# Altium footprint library FootPrintLib_8.PcbLib: 590 footprints (part 5 of 37)
Each footprint in its own frame and in the unit in brackets; x right, y up, seen from the top. Pads: shape width x height; smd on the part's side, far side on the other; paste and mask are expansions set on the pad; w line width, h text height; cw(c..) or ccw(c..) is an arc to the next point about the centre after c.
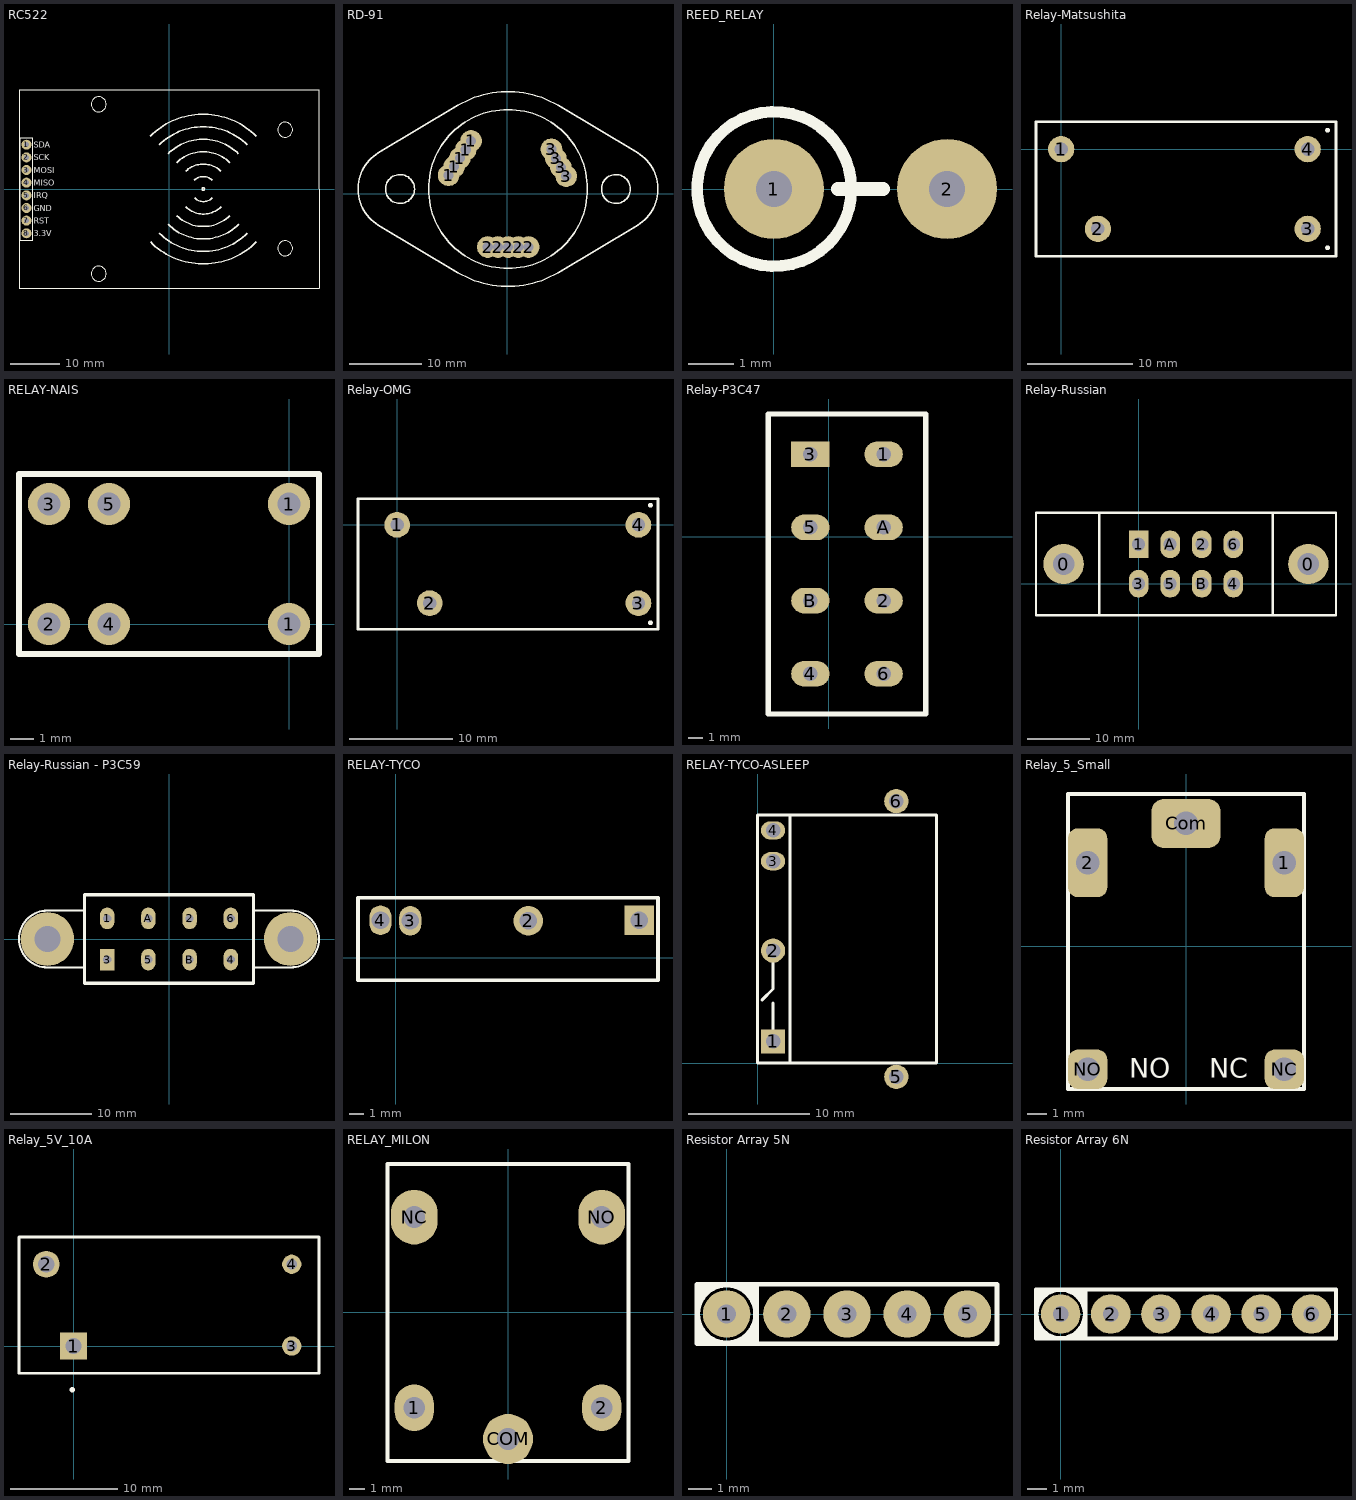
[diagram p4: the footprints below, top view; thin cyan lines are the x and y axes]

## RC522 [mm] "RC522, 8-Leads, Pitch 2.54mm"
height 5
pads (8):
  round 2 hole 1: 1(-28.6,8.89) 2(-28.6,6.35) 3(-28.6,3.81) 4(-28.6,1.27) 5(-28.6,-1.27) 6(-28.6,-3.81) 7(-28.6,-6.35) 8(-28.6,-8.89)
Top Overlay:
  circle w0.2: c-14.1,-17 r1.5
  circle w0.2: c-14.1,17 r1.5
  circle w0.2: c23.3,-11.9 r1.5
  circle w0.2: c23.3,11.9 r1.5
  circle w0.3: c6.875,0 r0.25
  lines w0.2: -30.1,-19.9 -30.1,19.9 30.1,19.9 30.1,-19.9 -30.1,-19.9 ; -29.85,-10.3 -29.85,10.325 -27.35,10.325 -27.35,-10.3 -29.85,-10.3
  lines w0.3: -3.732,10.607 cw(c6.875,0) 17.482,10.607 ; -3.707,-10.632 ccw(c6.9,-0.025) 17.507,-10.632 ; -1.964,8.839 cw(c6.875,0) 15.714,8.839 ; -1.939,-8.864 ccw(c6.9,-0.025) 15.739,-8.864 ; -0.196,7.071 cw(c6.875,0) 13.946,7.071 ; -0.171,-7.096 ccw(c6.9,-0.025) 13.971,-7.096 ; 1.572,5.303 cw(c6.875,0) 12.178,5.303 ; 1.597,-5.328 ccw(c6.9,-0.025) 12.203,-5.328 ; 3.339,3.536 cw(c6.875,0) 10.411,3.536 ; 3.364,-3.561 ccw(c6.9,-0.025) 10.436,-3.561 ; 5.107,1.768 cw(c6.875,0) 8.643,1.768 ; 5.132,-1.793 ccw(c6.9,-0.025) 8.668,-1.793
  text "SDA" at -27.125,7.875 h2
  text "SCK" at -27.125,5.335 h2
  text "MOSI" at -27.125,2.795 h2
  text "MISO" at -27.125,0.255 h2
  text "IRQ" at -27.125,-2.285 h2
  text "GND" at -27.125,-4.825 h2
  text "RST" at -27.125,-7.365 h2
  text "3.3V" at -27.125,-9.905 h2
3D body "RC522_V2.step": height 7.9, standoff -5.57, extent -30.1,-19.9 30.1,19.9

## RD-91 [mm]
pads (14):
  round 3 hole 1.4: 1(-8.145,2.595) 1(-7.375,3.785) 1(-6.595,4.965) 1(-5.775,6.125) 1(-5.035,7.345) 2(-2.725,-7.345) 2(-1.315,-7.345) 2(0.105,-7.345) 2(1.515,-7.345) 2(2.935,-7.345) 3(6.095,6.195) 3(6.715,4.915) 3(7.415,3.675) 3(8.145,2.465)
Top Overlay:
  circle w0.2: c0.08,0.69 r11
  circle w0.2: c-14.87,0.69 r2
  circle w0.2: c15.03,0.69 r2
  lines w0.2: -17.861,-4.31 cw(c-14.87,0.69) -17.861,5.69 -6.85,12.276 cw(c0.08,0.69) 7.01,12.276 18.021,5.69 cw(c15.03,0.69) 18.021,-4.31 7.01,-10.896 cw(c0.08,0.69) -6.85,-10.896 -17.861,-4.31
3D body "BTA_40_700_D.SLDPRT": height 17, standoff -6.5, extent -20.671,-12.844 20.881,14.156

## REED_RELAY [mm]
height 11
pads (2):
  round 2.2 hole 0.8: 1(0,0) 2(3.81,0)
Top Overlay:
  circle w0.254: c0.007,0 r1.7
  lines w0.305: 1.405,0 2.405,0
3D body "Standex-Meder Electronics-MK14-1A66_WEB.STEP": height 56.45, standoff -2.45, extent 0.032,-2 4.032,2

## Relay-Matsushita [mm] "Relay Matsushita 24VDC 10A"
height 19.05
pads (4):
  round 2.5 hole 1.3: 1(0,0) 2(3.5,-7.6) 3(23.5,-7.6) 4(23.5,0)
Top Overlay:
  circle w0.254: c25.4,-9.4 r0.1
  circle w0.254: c25.4,1.8 r0.1
  lines w0.254: -2.4,-10.2 -2.4,2.6 26.2,2.6 26.2,-10.2 -2.4,-10.2

## RELAY-NAIS [mil]
pads (6):
  round 70 hole 38: 1(0,0) 1(0,200) 2(-400,0) 3(-400,200) 4(-300,0) 5(-300,200)
Top Overlay:
  lines w10: -450,-50 -450,250 50,250 50,-50 -450,-50

## Relay-OMG [mm] "Relay Matsushita 24VDC 10A"
height 19.05
pads (4):
  round 2.5 hole 1.3: 1(0,0) 2(3.175,-7.62) 3(23.495,-7.62) 4(23.495,0)
Top Overlay:
  circle w0.254: c24.665,-9.525 r0.1
  circle w0.254: c24.665,1.905 r0.1
  lines w0.254: -3.81,-10.16 -3.81,2.54 25.4,2.54 25.4,-10.16 -3.81,-10.16

## Relay-P3C47 [mil]
pads (8):
  oval 105x70 hole 39.37: 1(150,225) 2(150,-175) 4(-50,-375) 5(-50,25) 6(150,-375) A(150,25) B(-50,-175)
  rect 105x70 hole 39.37: 3(-50,225)
Top Overlay:
  lines w15: -165,-485 265,-485 265,335 -165,335 -165,-485

## Relay-Russian [mm]
height 40
pads (10):
  round 6.5 hole 3.5 mask-2: 0(-12.065,3.175) 0(27.305,3.175)
  rect 3.175x4.445 hole 2.1: 1(0,6.35)
  oval 3.175x4.445 hole 2.1: 2(10.16,6.35) 3(0,0) 4(15.24,0) 5(5.08,0) 6(15.24,6.35) A(5.08,6.35) B(10.16,0)
Top Overlay:
  lines w0.381: -6.35,-5.08 21.59,-5.08 ; -6.35,-5.08 -6.35,11.43 ; -6.35,-5.08 -16.51,-5.08 -16.51,11.43 -6.35,11.43 ; -6.35,11.43 21.59,11.43 ; 21.59,-5.08 21.59,11.43 ; 21.59,-5.08 31.75,-5.08 31.75,11.43 21.59,11.43

## Relay-Russian - P3C59 [mil]
height 1574.8
pads (10):
  oval 70x105 hole 39.37: 1(-300,100) 2(100,100) 4(300,-100) 5(-100,-100) 6(300,100) A(-100,100) B(100,-100)
  rect 70x105 hole 39.37: 3(-300,-100)
  round 260 hole 125.98: ""(-590.55,0) ""(590.55,0)
Top Overlay:
  lines w10: -413.39,-137.8 -590.55,-137.8 cw(c-590.55,0) -590.55,137.8 -413.39,137.8 ; 413.39,-137.8 590.55,-137.8 ccw(c590.55,0) 590.55,137.8 413.39,137.8
  lines w15: -410,-215 -410,215 410,215 410,-215 -410,-215

## RELAY-TYCO [mm]
pads (4):
  rect 2x2 hole 1.2: 1(16.51,2.54)
  round 2 hole 1.2: 2(9,2.5)
  oval 1.5x2 hole 1.2: 3(1,2.5) 4(-1.016,2.54)
Top Overlay:
  lines w0.254: -2.54,-1.524 -2.54,4.064 17.78,4.064 17.78,-1.524 -2.54,-1.524

## RELAY-TYCO-ASLEEP [mm]
pads (6):
  rect 2x2 hole 1.2: 1(1.27,1.778)
  round 2 hole 1.2: 2(1.27,9.271) 5(11.43,-1.143) 6(11.43,21.59)
  oval 2x1.5 hole 1.2: 3(1.27,16.637) 4(1.27,19.177)
Top Overlay:
  lines w0.254: 0.381,5.207 1.27,6.096 1.27,9.271 ; 1.27,1.778 1.27,4.953 ; 2.667,0 2.667,20.447 ; 0,0 14.732,0 14.732,20.447 0,20.447 0,0

## Relay_5_Small [mm]
height 13
pads (5):
  rrect50% 2x3.5 hole 1.2: 1(5,4.25) 2(-5,4.25)
  rrect50% 3.5x2.5 hole 1.2: Com(0,6.25)
  rrect50% 2x2 hole 1.2: NC(5,-6.25) NO(-5,-6.25)
Top Overlay:
  lines w0.2: -6,-7.25 -6,7.75 6,7.75 6,-7.25 -6,-7.25
  text "NO" at -2.896,-6.68 h1
  text "NC" at 1.194,-6.68 h1
3D body "User Library-T74 4181.STEP": height 13.71, standoff -3.89, extent -6.131,-7.583 6.17,8.117

## Relay_5V_10A [mm]
height 14
pads (4):
  rect 2.5x2.5 hole 1.5: 1(0,0)
  round 2.5 hole 1.5: 2(-2.54,7.62)
  round 1.8 hole 1: 3(20.32,0) 4(20.32,7.62)
Top Overlay:
  circle w0.25: c-0.125,-4.064 r0.125
  lines w0.254: -5.08,-2.54 -5.08,10.16 22.86,10.16 22.86,-2.54 -5.08,-2.54

## RELAY_MILON [mm]
height 15.5
pads (5):
  oval 2.5x3 hole 1.4: 1(-6,-6.1) 2(6,-6.1)
  round 3.2 hole 1.4: COM(0,-8.1)
  oval 3x3.5 hole 1.4: NC(-6,6.1) NO(6,6.1)
Top Overlay:
  lines w0.254: -7.7,-9.5 7.7,-9.5 7.7,9.5 -7.7,9.5 -7.7,-9.5

## Resistor Array 5N [mm] "Resistor Networks, P2.54mm"
height 5.2
pads (5):
  round 2 hole 0.8: 1(0,0) 2(2.54,0) 3(5.08,0) 4(7.62,0) 5(10.16,0)
Top Overlay:
  circle w0.2: c0,0 r1.221
  region: 1.27,1.25 1.27,0.35 0.37,1.25
  region: 1.27,-1.25 0.37,-1.25 1.27,-0.35
  region: -1.25,-1.25 -1.25,-0.35 -0.35,-1.25
  region: -1.25,1.25 -0.35,1.25 -1.25,0.35
  lines w0.2: 1.27,-1.25 1.27,1.25 ; -1.25,-1.25 11.41,-1.25 11.41,1.25 -1.25,1.25 -1.25,-1.25
3D body "ResArray 5N.step": height 5.63, standoff -2.95, extent -1.27,-1.261 11.43,1.25

## Resistor Array 6N [mm] "Resistor Networks, P2.54mm"
height 5.2
pads (6):
  round 2 hole 0.8: 1(0,0) 2(2.54,0) 3(5.08,0) 4(7.62,0) 5(10.16,0) 6(12.7,0)
Top Overlay:
  circle w0.2: c0,0 r1.221
  region: 1.27,1.25 1.27,0.35 0.37,1.25
  region: 1.27,-1.25 0.37,-1.25 1.27,-0.35
  region: -1.25,-1.25 -1.25,-0.35 -0.35,-1.25
  region: -1.25,1.25 -0.35,1.25 -1.25,0.35
  lines w0.2: 1.27,-1.25 1.27,1.25 ; -1.25,-1.25 13.95,-1.25 13.95,1.25 -1.25,1.25 -1.25,-1.25
3D body "ResArray 6N.step": height 5.63, standoff -2.95, extent -1.27,-1.261 13.97,1.25